# Altium schematic symbol library 500SSP1S1M6QEA.SchLib: 1 symbol
Pins are listed as number, name and electrical type; pins without a type are passive.

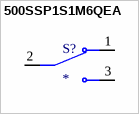
[diagram p0: symbol 500SSP1S1M6QEA]

## 500SSP1S1M6QEA
designator S?
Slide Switch, 500A Series, DPDT, ON-ON, 5A, 120VAC/28VDC, Silver, R/A PC Pin | E-Switch 500SSP1S1M6QEA; SnapEDA_Link: https://www.snapeda.com/parts/500SSP1S1M6QEA/E-Switch/view-part/?ref=snap; Package: None; Value: *; MF: E-Switch; MP: 500SSP1S1M6QEA; Check_prices: https://www.snapeda.com/parts/500SSP1S1M6QEA/E-Switch/view-part/?ref=eda
footprint SW_500SSP1S1M6QEA
pins: 1 NC, 2 COM, 3 NO